# Altium footprint library HSS 2026 PCB Kutubhane.PcbLib: 46 footprints (part 3 of 3)
Each footprint in its own frame and in the unit in brackets; x right, y up, seen from the top. Pads: shape width x height; smd on the part's side, far side on the other; paste and mask are expansions set on the pad; w line width, h text height; cw(c..) or ccw(c..) is an arc to the next point about the centre after c.
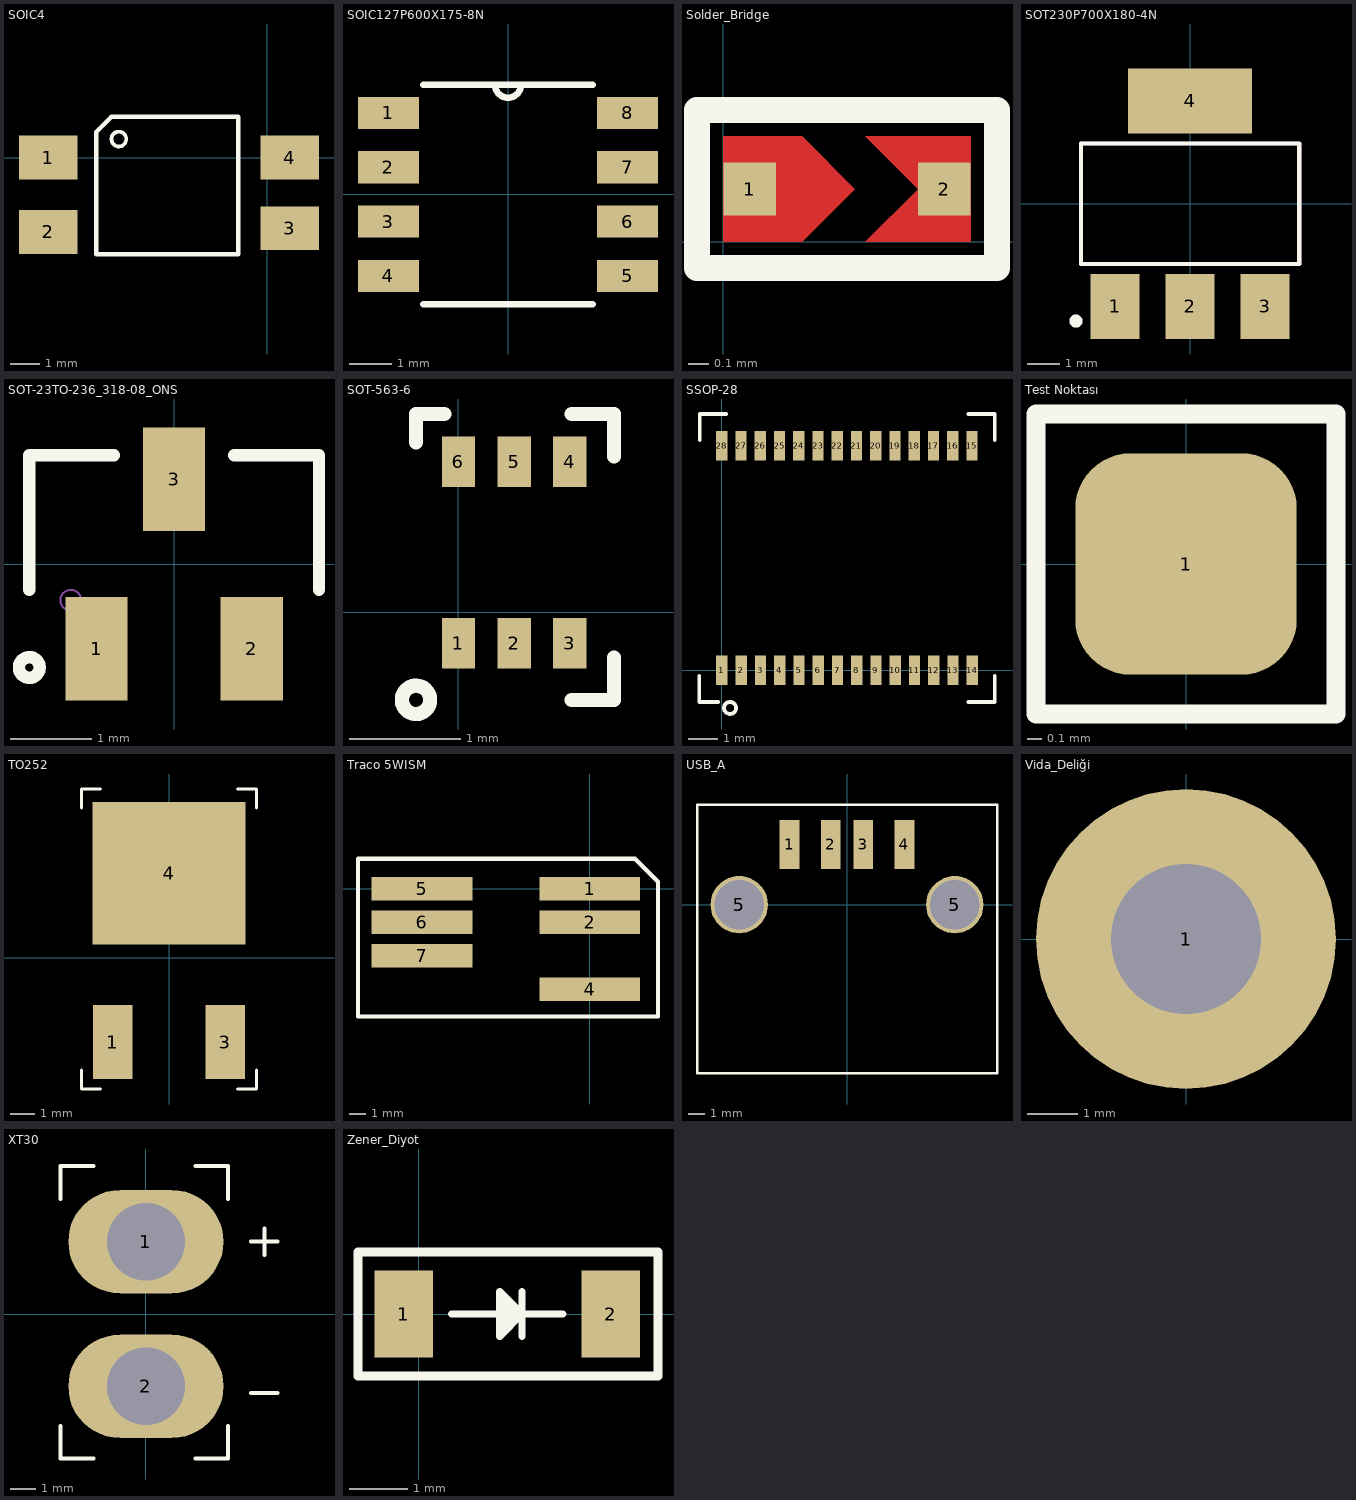
[diagram p2: the footprints below, top view; thin cyan lines are the x and y axes]

## SOIC4 [mm]
pads (4):
  rect 2x1.5 smd paste+0 mask+0.127: 1(-7.493,0) 2(-7.493,-2.54) 3(0.762,-2.413) 4(0.762,0)
Top Overlay:
  circle w0.127: c-5.08,0.635 r0.254
  lines w0.152: -5.855,-3.302 -1.003,-3.302 -1.003,1.397 -5.334,1.397 -5.855,0.876 -5.855,-3.302
3D body "DIP4 Gullwing.STEP": height 3.5, standoff -0.1, extent -8.102,-3.443 1.498,1.157

## SOIC127P600X175-8N [mil]
pads (8):
  rect 56x29.53 smd: 1(-110,75) 2(-110,25) 3(-110,-25) 4(-110,-75) 5(110,-75) 6(110,-25) 7(110,25) 8(110,75)
Top Overlay:
  lines w6: -78,-101 78,-101 ; -78,101 -12,101 ; 78,101 12,101 ; -12,101 ccw(c0,101) 12,101 ; -12,101 12,101
3D body "step_temp.STEP": height 68.9, standoff 0, extent -116.22,-96.46 120,96.46

## Solder_Bridge [mil]
pads (2):
  rect 10x10 smd paste-39.37 mask+0: 1(5,10) 2(42,10)
Top Layer:
  region: 0,0 0,20 15,20 15,0
  region: 15,0 15,10 25,10
  region: 25,10 15,20 15,10
  region: 27,0 47,0 47,20 27,20 37,10
Top Overlay:
  lines w5: -5,-5 -5,25 52,25 52,-5 0,-5 -5,-5

## SOT230P700X180-4N [mm]
pads (4):
  rect 1.5x2 smd paste+0 mask+0.102: 1(-2.3,-3.15) 2(0,-3.15) 3(2.3,-3.15)
  rect 3.8x2 smd paste+0 mask+0.102: 4(0,3.15)
Top Overlay:
  circle w0.2: c-3.5,-3.6 r0.1
  lines w0.127: -3.35,-1.85 3.35,-1.85 3.35,1.85 -3.35,1.85 -3.35,-1.85
Mechanical 13:
  lines w0.127: -3.35,-1.85 3.35,-1.85 3.35,1.85 -3.35,1.85 -3.35,-1.85
3D body "BCP56-16--3DModel-STEP-711646.STEP": height 1.57, standoff -0.08, extent -3.198,-3.571 3.302,3.429

## SOT-23TO-236_318-08_ONS [mil]
pads (3):
  rect 30x50 smd paste+0 mask+10: 1(-37.5,-41) 2(37.5,-41) 3(0,41)
Top Overlay:
  circle w6: c-70,-50 r5
  lines w6: -70,-12.5 -70,52.5 -29.1,52.5 ; 29.1,52.5 70,52.5 70,-12.5
Mechanical 13:
  circle w1: c-50,-17.5 r5
3D body "SOT-23TO-236_318-08_ONS.step": height 44.09, standoff 0, extent -60,-57.01 60,47.01

## SOT-563-6 [mm]
pads (6):
  rect 0.3x0.45 smd paste-1 mask+0.102: 1(0,-0.279) 2(0.5,-0.279) 3(1,-0.279) 4(1,1.35) 5(0.5,1.35) 6(0,1.35)
Top Overlay:
  circle w0.127: c-0.381,-0.787 r0.127
  lines w0.127: -0.381,1.524 -0.381,1.778 -0.127,1.778 ; 1.016,-0.787 1.397,-0.787 1.397,-0.406 ; 1.016,1.778 1.397,1.778 1.397,1.397
3D body "SOT563.STEP": height 0.53, standoff -0.02, extent -0.292,-0.279 1.308,1.321

## SSOP-28 [mm]
pads (28):
  rect 0.38x1 smd paste-1 mask+0.508: 1(0,0) 2(0.658,0) 3(1.308,0) 4(1.958,0) 5(2.608,0) 6(3.258,0) 7(3.908,0) 8(4.558,0) 9(5.208,0) 10(5.858,0) 11(6.508,0) 12(7.158,0) 13(7.808,0) 14(8.458,0) 15(8.45,7.585) 16(7.8,7.585) 17(7.15,7.585) 18(6.5,7.585) 19(5.85,7.585) 20(5.2,7.585) 21(4.55,7.585) 22(3.9,7.585) 23(3.25,7.585) 24(2.6,7.585) 25(1.95,7.585) 26(1.3,7.585) 27(0.65,7.585) 28(0,7.585)
Top Overlay:
  circle w0.127: c0.279,-1.27 r0.204
  lines w0.127: -0.762,-0.178 -0.762,-1.067 -0.127,-1.067 ; -0.749,7.772 -0.749,8.661 0.14,8.661 ; 8.331,-1.067 9.22,-1.067 9.22,-0.178 ; 8.331,8.661 9.22,8.661 9.22,7.772
3D body "ssop28_model.STEP": height 1.96, standoff -0.04, extent -0.887,-0.11 9.313,7.69

## Test Noktası [mm]
pads (1):
  rrect50% 1.5x1.5 smd paste-1 mask+0.102: 1(0,0)
Top Overlay:
  lines w0.127: -1.016,-1.016 -1.016,1.016 1.016,1.016 1.016,-1.016 -1.016,-1.016

## TO252 [mm]
pads (3):
  rect 1.6x3 smd paste-1 mask+0.102: 1(-2.286,-3.429) 3(2.286,-3.429)
  rect 6.2x5.8 smd paste-1 mask+0.102: 4(0,3.429)
Top Overlay:
  lines w0.127: -3.556,-4.572 -3.556,-5.334 -2.794,-5.334 ; -3.556,6.096 -3.556,6.858 -2.794,6.858 ; 2.794,-5.334 3.556,-5.334 3.556,-4.572 ; 2.794,6.858 3.556,6.858 3.556,6.096
3D body "TO-252-2.stp": height 2.35, standoff 0, extent -3.25,-4.355 3.25,5.625

## Traco 5WISM [mm]
pads (6):
  rect 6x1.4 smd paste-1 mask+0.102: 1(0,0) 2(0,-2) 4(0,-6) 5(-10,0) 6(-10,-2) 7(-10,-4)
Top Overlay:
  lines w0.254: -13.81,-7.62 -13.81,1.778 2.7,1.778 4.064,0.414 4.064,-7.62 -13.81,-7.62
3D body "tdn5wism_3d_drawing.stp": height 10.08, standoff -0.07, extent -12.175,-7.469 2.025,1.631

## USB_A [mm]
pads (6):
  rect 1.2x3 smd paste-1 mask+0.508: 1(-3.5,3.67) 2(-1,3.67) 3(1,3.67) 4(3.5,3.67)
  round 3.5 hole 3 paste-1 mask+0.508: 5(-6.57,0) 5(6.57,0)
Top Overlay:
  lines w0.152: -9.144,-10.28 0,-10.28 9.144,-10.28 9.144,6.096 -9.144,6.096 -9.144,-10.28
3D body "femaleThruHoleUSB.stp": height 7.55, standoff -3.58, extent -7.888,-10.207 7.888,4.238

## Vida_Deliği [mm]
pads (1):
  round 6 hole 3 mask+0.05: 1(0,0)

## XT30 [mm]
pads (2):
  oval 6x4 hole 3 paste-1 mask+0.508: 1(0,2.794) 2(0,-2.794)
Top Overlay:
  lines w0.152: -3.302,-4.318 -3.302,-5.588 -2.032,-5.588 ; -3.302,4.445 -3.302,5.715 -2.032,5.715 ; 1.905,-5.588 3.175,-5.588 3.175,-4.318 ; 1.905,5.715 3.175,5.715 3.175,4.445 ; 4.064,-3.048 5.08,-3.048 ; 4.064,2.794 5.08,2.794 4.572,2.794 4.572,3.302 4.572,2.286
3D body "XT30-M_m.ver.STEP": height 12.9, standoff -3.6, extent -3.075,-5.429 3.025,5.571

## Zener_Diyot [mm]
pads (2):
  rect 1x1.5 smd paste-1 mask+0.102: 1(-0.254,0) 2(3.302,0)
Top Overlay:
  region: 1.778,0 1.397,0.381 1.397,-0.381
  lines w0.127: 0.572,0 1.778,0 ; 1.587,0.191 1.778,0 ; 1.778,-0.381 1.778,0.381 ; 2.476,0 1.968,0 1.778,0 ; 1.778,0 1.397,-0.381 1.397,0.381 1.778,0
  lines w0.152: -1.041,-1.067 -1.041,1.067 4.115,1.067 4.115,-1.067 -1.041,-1.067
3D body "MiniMelfDiode.stp": height 1.63, standoff 0.04, extent -0.326,-0.797 3.374,0.797